# Altium integrated library Comp_Int_Lib.IntLib: 28 symbols
Pins are listed as number, name and electrical type; pins without a type are passive.

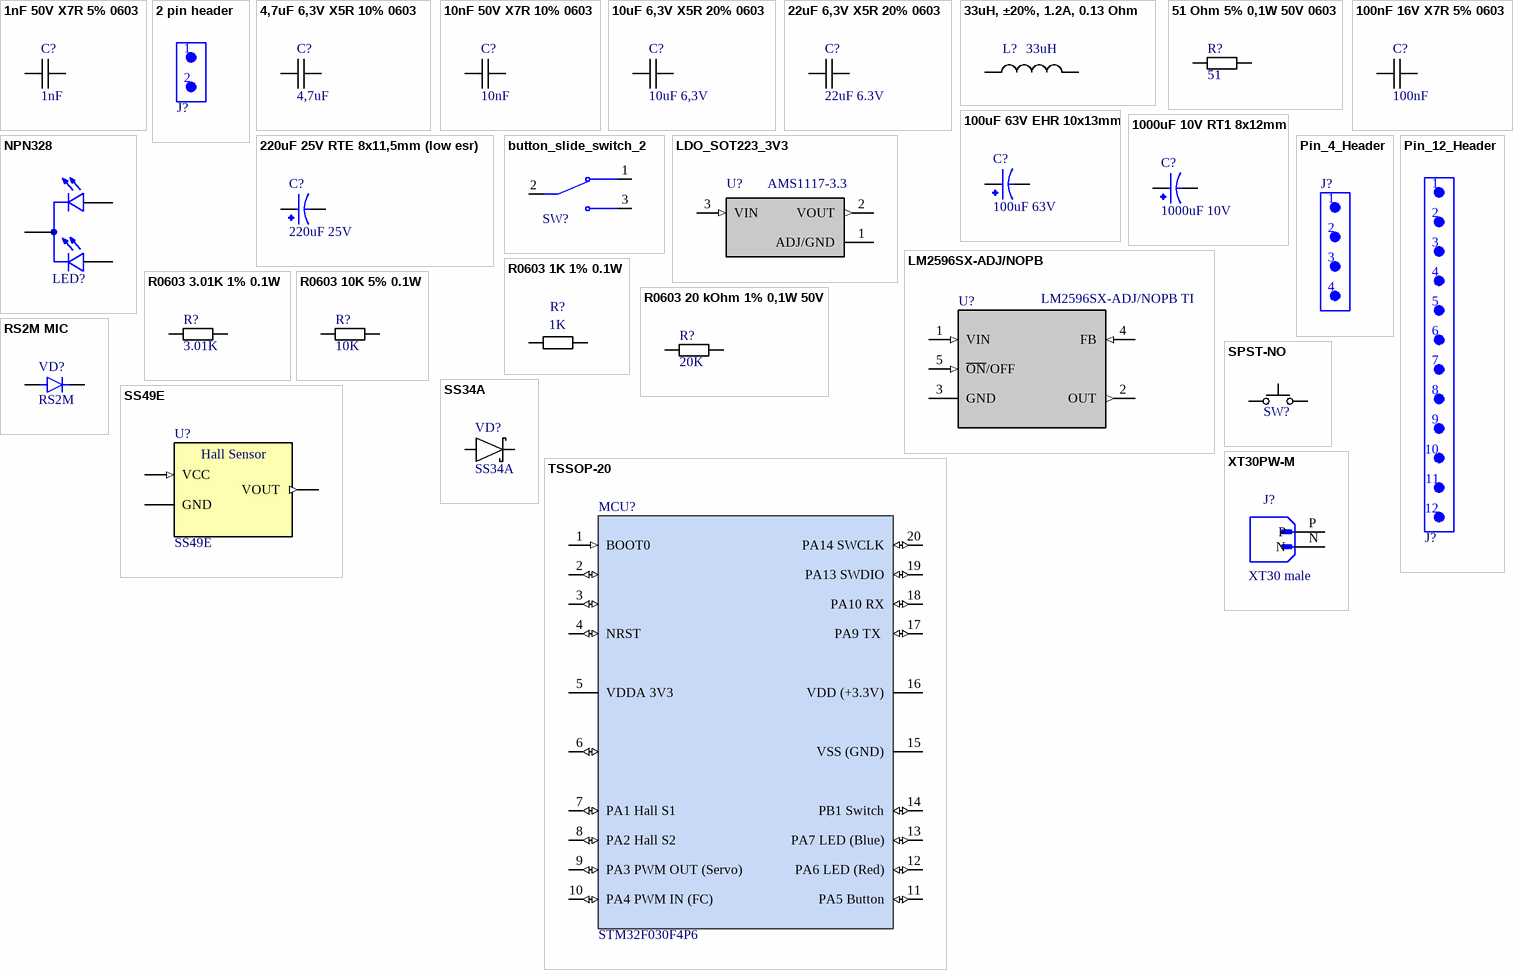
[diagram p0: symbols 1nF 50V X7R 5% 0603 to XT30PW-M]

## 1nF 50V X7R 5% 0603
designator C?, comment 1nF
1nF 50V X7R 5% 0603 4k/reel (C0603B102J500NT-Hitano); Tolerance: 0.05; MF: Hitano; Component Link 1 Description: Datasheet; Part Number: 1nF 50V X7R 5% 0603; MPN: C0603B102J500NT; Capacitance: 1nF; Voltage: 50V; Dielectric: X7R; Category: Ceramic Capacitor; Supplier 1: rcscomponents; Supplier Part Number 1: 3303; Supplier Link 1: https://www.rcscomponents.kiev.ua/product/1nf-50v-x7r-5-0603-4k-reel-c0603b102j500nt-hitano-kondensator-keramichnyi-smd_3303.html; Component Link 1 URL: https://www.rcscomponents.kiev.ua/datasheets/X7R_X5R.pdf
footprint C_0603 (C?)
pins: 1, 2

## 2 pin header
designator J?  (value not drawn)
p.2,54mm; Part Number: 2 pin header; MPN: 2 pin header; Supplier 1: Arduino UA; Supplier Part Number 1: SKV114; Supplier Link 1: https://arduino.ua/ru/prod332-konnektor-40-pin-papa
footprint pin_h_2_p2,54mm
pins: 1, 2

## 4,7uF 6,3V X5R 10% 0603
designator C?, comment 4,7uF
4,7uF 6,3V X5R 10% 0603 (CL10A475KQ8NNNC-Samsung); Voltage: 6.3V; Tolerance: 0.1; Component Link 1 Description: Datasheet; Part Number: 4,7uF 6,3V X5R 10% 0603; MPN: CL10A475KQ8NNNC; Capacitance: 4,7uF; Dielectric: X5R; Category: Ceramic Capacitor; MF: Samsung; Supplier 1: rcscomponents; Supplier Part Number 1: 50674; Supplier Link 1: https://www.rcscomponents.kiev.ua/product/4-7uf-6-3v-x5r-10-0603-cl10a475kq8nnnc-samsung_50674.html; Component Link 1 URL: https://www.rcscomponents.kiev.ua/datasheets/cl_series_mlcc_datasheet.pdf
footprint C_0603 (C?)
pins: 1, 2

## 10nF 50V X7R 10% 0603
designator C?, comment 10nF
10nF 50V X7R 10% 0603 (CL10B103KB8NNNC-Samsung); Tolerance: 0.1; Component Link 1 Description: Datasheet; Part Number: 10nF 50V X7R 10% 0603; MPN: CL10B103KB8NNNC; Capacitance: 10nF; Voltage: 50V; Dielectric: X7R; Category: Ceramic Capacitor; MF: Samsung; Supplier 1: rcscomponents; Supplier Part Number 1: 34908; Supplier Link 1: https://www.rcscomponents.kiev.ua/product/10nf-50v-x7r-10-0603-cl10b103kb8nnnc-samsung-kondensator-keramichnyi-smd_34908.html; Component Link 1 URL: https://www.rcscomponents.kiev.ua/datasheets/cl_series_mlcc_datasheet.pdf
footprint C_0603 (C?)
pins: 1, 2

## 10uF 6,3V X5R 20% 0603
designator C?, comment 10uF 6,3V
10uF 6,3V X5R 20% 0603; MPN: C0603X106M063NT; Voltage: 6.3V; Tolerance: 0.2; MF: Hitano; Component Link 1 Description: Datasheet; Part Number: 10uF 6,3V X5R 20% 0603; Capacitance: 10uF; Dielectric: X5R; Category: Ceramic Capacitor; Supplier 1: rcscomponents; Supplier Part Number 1: 50744; Supplier Link 1: https://www.rcscomponents.kiev.ua/product/10uf-6-3v-x5r-20-0603-4k-reel-c0603x106m063nt-hitano-kondensator-keramichnyi-smd_50744.html; Component Link 1 URL: https://www.rcscomponents.kiev.ua/datasheets/X7R_X5R.pdf
footprint C_0603 (C?)
footprint С_0603
pins: 1, 2

## 22uF 6,3V X5R 20% 0603
designator C?, comment 22uF 6.3V
22uF 6,3V X5R 20% 0603; MPN: CL10A226MQ8NRNC; Tolerance: 0.2; MF: Samsung; Component Link 1 Description: Datasheet; Part Number: 22uF 6,3V X5R 20% 0603; Capacitance: 22uF; Voltage: 6.3V; Dielectric: X5R; Category: Ceramic Capacitor; Supplier 1: rcscomponents; Supplier Part Number 1: 128028; Supplier Link 1: https://www.rcscomponents.kiev.ua/product/22uf-6-3v-x5r-20-0603-cl10a226mq8nrnc-samsung_128028.html; Component Link 1 URL: https://www.rcscomponents.kiev.ua/datasheets/cl_series_mlcc_datasheet.pdf
footprint C_0603 (C?)
footprint С_0603
pins: 1, 2

## 33uH, ±20%, 1.2A, 0.13 Ohm
designator L?, comment 33uH
SND0705-330M (33uH, ±20%, 1.2A, 0.13 Ohm, SMD: 7.8x7.0mm, h=5.0mm) Anla Tech; MP: B82472P6472M000; MF: AnlaTech/IH; Inductance: 33 µH; DCR: 0.13 Ω; Component Link 1 Description: Datasheet; Price: None; Value: *; Package: None; Purchase-URL: https://pricing.snapeda.com/search/part/B82472P6472M000/?ref=eda; SnapEDA_Link: https://www.snapeda.com/parts/B82472P6472M000/TDK/view-part/?ref=snap; Check_prices: https://www.snapeda.com/parts/B82472P6472M000/TDK/view-part/?ref=eda; Availability: In Stock; Part Number: 33uH, ±20%, 1.2A, 0.13 Ohm; MPN: SND0705-330M; Current: 1.2A; Tolerance: ±20%; Category: Power Inductor; Supplier 1: rcscomponents; Supplier Part Number 1: 39225; Supplier Link 1: https://www.rcscomponents.kiev.ua/product/snd0705-330m-33uh-20-1-2a-0-13-ohm-smd-7-8x7-0mm-h-5-0mm-anla-tech-drosel-sylovyi_39225.html; Component Link 1 URL: https://www.rcscomponents.kiev.ua/datasheets/SND-1.pdf
footprint L_SND0705
pins: 1, 2

## 51 Ohm 5% 0,1W 50V 0603
designator R?, comment 51
51 Ohm 5% 0,1W 50V 0603; MPN: RC0603JR-51R; Resistance: 51 Ohm; Power: 0.1W; Tolerance: 0.05; MF: Hitano; Component Link 1 Description: Datasheet; Part Number: 51 Ohm 5% 0,1W 50V 0603; Voltage: 50V; Category: Thick Film Resistor; Supplier 1: rcscomponents; Supplier Part Number 1: 4627; Supplier Link 1: https://www.rcscomponents.kiev.ua/product/51-ohm-5-0-1w-50v-0603-rc0603jr-51r-hitano-rezystor-smd_4627.html; Component Link 1 URL: https://www.rcscomponents.kiev.ua/datasheets/rc_series_hitano-datasheet.pdf
footprint R0603
pins: 1, 2

## 100nF 16V X7R 5% 0603
designator C?, comment 100nF
100nF 16V X7R 5% 0603 (CL10B104JO8NNNC – Samsung); Tolerance: 0.05; Component Link 1 Description: Datasheet; Part Number: 100nF 16V X7R 5% 0603; MPN: CL10B104JO8NNNC; Capacitance: 100nF; Voltage: 16V; Dielectric: X7R; Category: Ceramic Capacitor; MF: Samsung; Supplier 1: rcscomponents; Supplier Part Number 1: 153351; Supplier Link 1: https://www.rcscomponents.kiev.ua/product/100nf-16v-x7r-5-0603-cl10b104jo8nnnc-samsung_153351.html; Component Link 1 URL: https://www.rcscomponents.kiev.ua/datasheets/cl_series_mlcc_datasheet.pdf
footprint C_0603 (C?)
pins: 1, 2

## 100uF 63V EHR 10x13mm
designator C?, comment 100uF 63V
100uF 63V EHR 10x13mm (EHR101M63B-Hitano)  Electrolytic; MP: EEUFR1J101LB; MF: Hitano; Component Link 1 Description: Datasheet; Package: RADIAL-2 Panasonic; Value: *; SnapEDA_Link: https://www.snapeda.com/parts/EEUFR1J101LB/Panasonic/view-part/?ref=snap; Price: None; Availability: In Stock; Check_prices: https://www.snapeda.com/parts/EEUFR1J101LB/Panasonic/view-part/?ref=eda; Part Number: 100uF 63V EHR 10x13mm; MPN: EHR101M63B-Hitano; Capacitance: 100uF; Voltage: 63V; Category: Electrolytic; Supplier 1: rcscomponents; Supplier Part Number 1: 50458; Supplier Link 1: https://www.rcscomponents.kiev.ua/product/100uf-63v-ehr-10x13mm-ehr101m63b-hitano-elektrolitychnyi-kondensator_50458.html; Component Link 1 URL: https://www.rcscomponents.kiev.ua/datasheets/EHR_081225.pdf
footprint C_POL_D8_P3.5 (Footprint not found)
footprint C_POL_D10_P5 (Footprint not found)
pins: N, P

## 220uF 25V RTE 8x11,5mm (low esr)
designator C?, comment 220uF 25V
220uF 25V RTE 8x11,5mm (low esr) (RTE1E221M0812-LEAGUER) Electrolytic; MP: EEUFR1J101LB; Component Link 1 Description: Datasheet; Package: RADIAL-2 Panasonic; Value: *; SnapEDA_Link: https://www.snapeda.com/parts/EEUFR1J101LB/Panasonic/view-part/?ref=snap; Price: None; Availability: In Stock; MF: LEAGUER; Check_prices: https://www.snapeda.com/parts/EEUFR1J101LB/Panasonic/view-part/?ref=eda; Part Number: 220uF 25V RTE 8x11,5mm (low esr); MPN: RTE1E221M0812-LEAGUER; Capacitance: 220uF; Voltage: 25V; ESR: low; Category: Electrolytic; Supplier 1: rcscomponents; Supplier Part Number 1: 180534; Supplier Link 1: https://www.rcscomponents.kiev.ua/product/220uf-25v-rte-8x11-5mm-low-esr-rte1e221m0812-leaguer-elektrolitychnyi-kondensator-nyzkoimpedansnyi_180534.html; Component Link 1 URL: https://www.rcscomponents.kiev.ua/datasheets/leaguer-rte_series-datasheet.pdf
footprint C_POL_D8_P3.5 (Footprint not found)
footprint C_POL_D10_P5 (Footprint not found)
pins: N, P

## 1000uF 10V RT1 8x12mm
designator C?, comment 1000uF 10V
1000uF 10V RT1 8x12mm +105°С; MPN: RT11A102M0812; MP: EEUFR1J101LB; MF: Leaguer; Dielectric: electrolit; Component Link 1 Description: Datasheet; Package: RADIAL-2 Panasonic; Value: *; SnapEDA_Link: https://www.snapeda.com/parts/EEUFR1J101LB/Panasonic/view-part/?ref=snap; Price: None; Availability: In Stock; Check_prices: https://www.snapeda.com/parts/EEUFR1J101LB/Panasonic/view-part/?ref=eda; Part Number: 1000uF 10V RT1 8x12mm; Capacitance: 1000uF; Voltage: 10V; Category: Pol electrolit; Supplier 1: rcscomponents; Supplier Part Number 1: 124893; Supplier Link 1: https://www.rcscomponents.kiev.ua/product/1000uf-10v-rt1-8x12mm-rt11a102m0812-leaguer-elektrolitychnyi-kondensator_124893.html; Component Link 1 URL: https://www.rcscomponents.kiev.ua/datasheets/ke47003518x36t-datasheet.pdf
footprint C_POL_D8_P3.5 (Footprint not found)
footprint C_POL_D10_P5 (Footprint not found)
pins: N, P

## button_slide_switch_2
designator SW?  (value not drawn)
8x6,9x4,3; MPN: SK-12D11-VG3 KLS; MF: TE Connectivity; MP: STS121RA04; Component Link 1 Description: Datasheet; SnapEDA_Link: https://www.snapeda.com/parts/STS121RA04/TE+Connectivity+ALCOSWITCH+Switches/view-part/?ref=snap; Package: None; Value: *; Check_prices: https://www.snapeda.com/parts/STS121RA04/TE+Connectivity+ALCOSWITCH+Switches/view-part/?ref=eda; Part Number: button_slide_switch_2; Supplier 1: rcscomponents148265; Supplier Link 1: https://www.rcscomponents.kiev.ua/product/peremykach-rushiinyi-sk-12d11-vg3_148265.html; Component Link 1 URL: https://www.rcscomponents.kiev.ua/datasheets/sk-12d11-vg3.pdf; Supplier Part Number 1: 148265
footprint button_slide_switch_2 (Footprint not found)
pins: 1, 2, 3

## LDO_SOT223_3V3
designator U?, comment AMS1117-3.3
Linear Voltage Regulator IC Positive Fixed 1 Output 1A SOT-223-3L; Part Number: LDO_SOT223_3V3; MF: Multiple; VOUT: 3.3V; VIN (Max): 15V; Dropout: 1.1V; Component Link 1 Description: Datasheet; SnapEDA_Link: https://www.snapeda.com/parts/AMS1117-3.3/UMW/view-part/?ref=snap; Package: SOT-223-3L UMW; Value: *; MP: AMS1117-3.3; Check_prices: https://www.snapeda.com/parts/AMS1117-3.3/UMW/view-part/?ref=eda; MPN: AMS1117-3.3; IOUT: 1A; Output Type: Fixed; Category: LDO Regulator (SMD); Supplier 1: rcscomponents; Supplier Part Number 1: 87031; Supplier Link 1: https://www.rcscomponents.kiev.ua/product/ams1117-3-3_87031.html; Component Link 1 URL: https://mm.digikey.com/Volume0/opasdata/d220001/medias/docus/7158/5272_AMS1117-3.3.pdf
footprint LDO_SOT223 (Footprint not found)
pins: 1 ADJ/GND (power), 2 VOUT (out), 3 VIN (in)

## LM2596SX-ADJ/NOPB
designator U?, comment LM2596SX-ADJ/NOPB TI
DC/DC Buck Converter IC; MF: Texas Instruments; VIN: 4.5–40V; VOUT: 1.23–37 V, Adjustable; IOUT: 3A; Frequency: 150 kHz; Component Link 1 Description: Datasheet; SnapEDA_Link: https://www.snapeda.com/parts/LM2596SX-ADJ/NOPB/Texas+Instruments/view-part/?ref=snap; Package: TO-263-5 Texas Instruments; Value: *; MP: LM2596SX-ADJ/NOPB; Check_prices: https://www.snapeda.com/parts/LM2596SX-ADJ/NOPB/Texas+Instruments/view-part/?ref=eda; Part Number: LM2596SX-ADJ/NOPB; MPN: LM2596SX-ADJ/NOPB; Type: Adjustable; Category: Buck Converter (SMD); Supplier 1: rcscomponents; Supplier Part Number 1: 61180; Supplier Link 1: https://www.rcscomponents.kiev.ua/product/lm2596sx-adj-nopb_61180.html; Component Link 1 URL: https://www.ti.com/general/docs/suppproductinfo.tsp?distId=10&gotoUrl=http%3A%2F%2Fwww.ti.com%2Flit%2Fgpn%2Flm2596
footprint LM2596SX-ADJ/NOPB (Footprint not found)
pins: 1 VIN (in), 2 OUT (out), 3 GND (power), 4 FB (in), 5 ~{ON}/OFF (in)

## NPN328
designator LED?, comment Led GB  (value not drawn)
Led 5mm Green Blue СС; Part Number: NPN328; MF: Vishay; MP: TLUV5300; VRRM: 3-3.2V; IF: 0.020A; SnapEDA_Link: https://www.snapeda.com/parts/TLUV5300/Vishay%20Semiconductor%20Opto%20Division/view-part/233523/?ref=snap; Price: None; Package: Radial Vishay; Availability: Unavailable; Value: *; MPN: NPN328; Category: Led; Supplier 1: Arduino.ua; Supplier Part Number 1: NPN328; Supplier Link 1: https://arduino.ua/ru/prod6409-svitlodiod-dvokolirnii-prozorii-3mm-katod-sinii-zelenii
footprint led_5mm_3pin (Footprint not found)
pins: 1 ANODE_GREEN, 2 COMMON_CATHODE, 3 ANODE_BLUE

## Pin_4_Header
designator J?  (value not drawn)
footprint pin_h_4_p2,54mm
pins: 1, 2, 3, 4

## Pin_12_Header
designator J?  (value not drawn)
footprint pin_h_12_p2,54mm
pins: 1, 2, 3, 4, 5, 6, 7, 8, 9, 10, 11, 12

## R0603 1K 1% 0.1W
designator R?, comment 1K
R0603 1K 1% 0.1W YAGEO; MPN: RC0603FR-071KL; Power: 1/10W; Tolerance: 0.01; Voltage: 75V; TCR: ±100 ppm/°C; Component Link 1 Description: Datasheet; Part Number: R0603 1K 1% 0.1W; Resistance: 1k; Category: Thick Film Resistor; MF: YAGEO; Supplier 1: rcscomponents; Supplier Part Number 1: 182684; Supplier Link 1: https://www.rcscomponents.kiev.ua/product/1-kohm-1-0-1w-75v-0603-rc0603fr-071kl-yageo-rezystor-smd_182684.html; Component Link 1 URL: https://www.rcscomponents.kiev.ua/datasheets/rc0603-272842.pdf
footprint R0603
pins: 1, 2

## R0603 3.01K 1% 0.1W
designator R?, comment 3.01K
R0603 3.01K 1% 0.1W Hitano; MPN: RC0603FR-3K01R; Tolerance: 0.01; Voltage: 50V; TCR: ±100 ppm/°C; Component Link 1 Description: Datasheet; Part Number: R0603 3.01K 1% 0.1W; Resistance: 3.01K; Power: 0.1W; Category: Thick Film Resistor; MF: Hitano; Supplier 1: rcscomponents; Supplier Part Number 1: 27651; Supplier Link 1: https://www.rcscomponents.kiev.ua/product/3-01-kohm-1-0-1w-50v-0603-rc0603fr-3k01r-hitano-rezystor-smd_27651.html; Component Link 1 URL: https://www.rcscomponents.kiev.ua/datasheets/RC0603HIT.pdf
footprint R0603
pins: 1, 2

## R0603 10K 5% 0.1W
designator R?, comment 10K
10 kOhm 5% 0,1W 50V; Part Number: R0603 10K 5% 0.1W; MPN: RC0603JR-0710KL; Power: 0.1W; Tolerance: 0.05; MF: Yageo; Component Link 1 Description: Datasheet; Resistance: 10K; Voltage: 50V; Category: Thick Film Resistor; Supplier 1: rcscomponents; Supplier Part Number 1: 107096; Supplier Link 1: https://www.rcscomponents.kiev.ua/product/10-kohm-5-0-1w-50v-0603-rc0603jr-0710kl-yageo_107096.html
footprint R0603
pins: 1, 2

## R0603 20 kOhm 1% 0,1W 50V
designator R?, comment 20K
20 kOhm 1% 0,1W 50V; Part Number: R0603 20 kOhm 1% 0,1W 50V; MPN: RC0603FR-20KR; Power: 0.1W; Tolerance: 0.01; MF: Hitano; Component Link 1 Description: Datasheet; Resistance: 20K; Voltage: 50V; Category: Thick Film Resistor; Supplier 1: rcscomponents; Supplier Part Number 1: 16748; Supplier Link 1: https://www.rcscomponents.kiev.ua/product/20-kohm-1-0-1w-50v-0603-rc0603fr-20kr-hitano-rezystor-smd_16748.html; Component Link 1 URL: https://www.rcscomponents.kiev.ua/datasheets/rc_series_hitano-datasheet.pdf
footprint R0603
pins: 1, 2

## RS2M MIC
designator VD?, comment RS2M
Vf 1.3 / I2A / 1000V; Part Number: RS2M MIC; MF: MIC; IF: 2A; VF: 1.3V; Component Link 1 Description: Datasheet; Package: DO-214AA-2 Taiwan Semiconductor; Price: None; Value: *; SnapEDA_Link: https://www.snapeda.com/parts/RS2M/Taiwan+Semiconductor/view-part/?ref=snap; MP: RS2M; Availability: In Stock; Check_prices: https://www.snapeda.com/parts/RS2M/Taiwan+Semiconductor/view-part/?ref=eda; MPN: RS2M MIC; VRRM: 1000V; Category: Diode; Supplier 1: rcscomponents; Supplier Part Number 1: 182600; Supplier Link 1: https://www.rcscomponents.kiev.ua/product/rs2m_182600.html; Component Link 1 URL: https://www.rcscomponents.kiev.ua/product/rs2m_182600.html
footprint VD_DO-214AA (Footprint not found)
pins: A, C K

## SPST-NO
designator SW?, comment 4,5x4,5, H7mm,  (value not drawn)
MPN: KFC-045P3-7.0; Part Number: SPST-NO; Param 1 (Value): 0,98N.; Param 3 (Tolerance): 12VDC/50mA; Param 4 (Category): Tact button corner THT; MF: Daier; Param 2 (Power): 4,5x4,5, H7mm; Supplier 1: rcscomponents.; Supplier Part Number 1: 209769; Supplier Link 1: https://www.rcscomponents.kiev.ua/product/knopka-taktova-kutova-4-5x4-5-h7mm-kfc-045p3-7-0_209769.html
footprint button_SPST_NO
pins: A, B

## SS34A
designator VD?
Vrrm 40V / If 3А / Vf0,5V / Ifsm80A; IF: 3A; VF: 0.5V; IFSM: 80A; MF: Hottech; Component Link 1 Description: Datasheet; Part Number: SS34A; MPN: SS34A; VRRM: 40V; Category: Schottky Diode; Supplier 1: rcscomponents; Supplier Part Number 1: 199953; Supplier Link 1: https://www.rcscomponents.kiev.ua/product/ss34a_199953.html; Component Link 1 URL: https://www.rcscomponents.kiev.ua/datasheets/2204281430_Guangdong-Hottech-SS34A_C2886580.pdf
footprint D_SCH_SS34A
pins: A 3, K 4

## SS49E
designator U?
TO92; MF: Honeywell; Component Link 1 Description: Datasheet; Supply Voltage: 4.5–6.0 V; Output Voltage: 0.2–4.8 V; Sensitivity: 1.0 mV/G typ.; MPN: SS49E; Supplier 1: Arduino.ua; Supplier Part Number 1: DAT189; Supplier Link 1: https://arduino.ua/ru/prod1474-datchik-holla-ss49e; Component Link 1 URL: https://content.instructables.com/ORIG/FHV/BQO4/JVR5YV9R/FHVBQO4JVR5YV9R.pdf; Part Number: SS49E; Type: Analog
footprint SS49E (Footprint not found)
pins: 1 VCC (in), 2 GND (power), 3 VOUT (out)
text: Hall Sensor

## TSSOP-20
designator MCU?, comment STM32F030F4P6
MCU; Part Number: TSSOP-20; MF: STMicroelectronics; Core: ARM Cortex-M0; CPU Frequency: 48 MHz; Flash: 16 KB; RAM: 4 KB; ADC: 12-bit; GPIO: 15; Operating Voltage: 2.4–3.6 V; Component Link 1 Description: Datasheet; SnapEDA_Link: https://www.snapeda.com/parts/STM32F030F4P6/STMicroelectronics/view-part/?ref=snap; Package: TSSOP-20; Value: *; MP: STM32F030F4P6; Check_prices: https://www.snapeda.com/parts/STM32F030F4P6/STMicroelectronics/view-part/?ref=eda; MPN: STM32F030F4P6; Supplier 1: rcscomponents; Supplier Part Number 1: 68666; Supplier Link 1: https://www.rcscomponents.kiev.ua/product/stm32f030f4p6_68666.html; Component Link 1 URL: https://www.rcscomponents.kiev.ua/datasheets/dm00088500-datasheet.pdf
footprint TSSOP-20
pins: 1 BOOT0 (in), 2 PF0/OSC_IN (io), 3 PF1/OSC_OUT (io), 4 NRST (io), 5 VDDA 3V3 (power), 6 PA0  (io), 7 PA1 Hall S1  (io), 8 PA2 Hall S2 (io), 9 PA3 PWM OUT (Servo) (io), 10 PA4 PWM IN (FC) (io), 11 PA5 Button (io), 12 PA6 LED (Red) (io), 13 PA7 LED (Blue) (io), 14 PB1 Switch (io), 15 VSS (GND) (power), 16 VDD (+3.3V) (power), 17 PA9 TX  (io), 18 PA10 RX (io), 19 PA13 SWDIO (io), 20 PA14 SWCLK (io)

## XT30PW-M
designator J?, comment XT30 male
Socket; DC supply; XT30; male; PIN: 2; on PCBs; THT; Colour: yellow; MF: AMASS; MP: XT30PW-M; SnapEDA_Link: https://www.snapeda.com/parts/XT30PW-M/AMASS/view-part/?ref=snap; Package: None; Value: *; Check_prices: https://www.snapeda.com/parts/XT30PW-M/AMASS/view-part/?ref=eda; Part Number: XT30PW-M; MPN: XT30PW-M; Supplier 1: IMRAD; Supplier Part Number 1: 395565; Supplier Link 1: https://imrad.com.ua/ru/xt30pw-m
footprint XT30PW-M (Footprint not found)
pins: N (power), P (power)